# Altium footprint library SamacSys.PcbLib: 1008 footprints (part 12 of 63)
Each footprint in its own frame and in the unit in brackets; x right, y up, seen from the top. Pads: shape width x height; smd on the part's side, far side on the other; paste and mask are expansions set on the pad; w line width, h text height; cw(c..) or ccw(c..) is an arc to the next point about the centre after c.
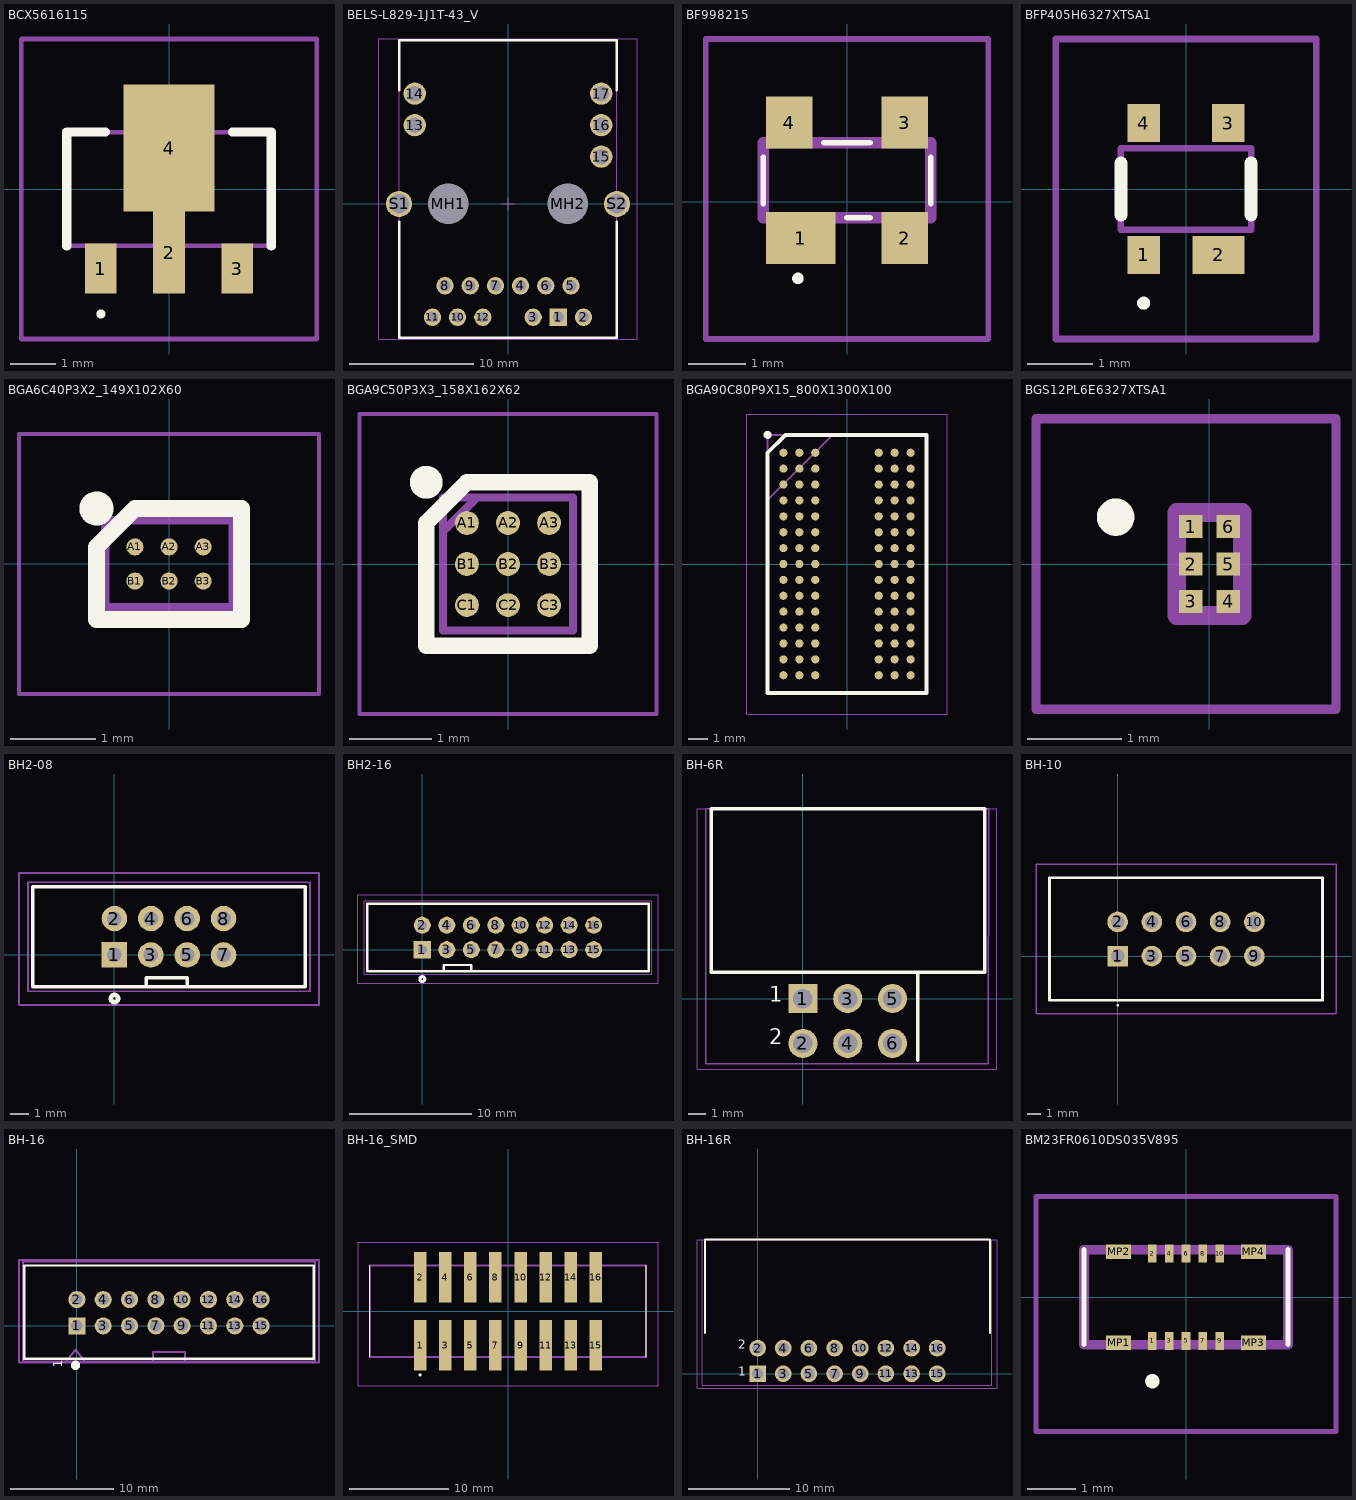
[diagram p11: the footprints below, top view; thin cyan lines are the x and y axes]

## BCX5616115 [mm]
pads (4):
  rect 0.7x1.1 smd: 1(-1.5,-1.75) 3(1.5,-1.75)
  rect 0.7x1.8 smd: 2(0,-1.4)
  rect 2x2.8 smd: 4(0,0.9)
Top Overlay:
  lines w0.1: -1.5,-2.8 ccw(c-1.5,-2.75) -1.5,-2.7 ccw(c-1.5,-2.75) -1.5,-2.8
  lines w0.2: -2.25,-1.25 -2.25,1.25 -1.4,1.25 ; 1.4,1.25 2.25,1.25 2.25,-1.25
Assembly:
  lines w0.1: -2.25,-1.25 -2.25,1.25 2.25,1.25 2.25,-1.25 -2.25,-1.25
Countryard:
  lines w0.1: -3.25,-3.3 -3.25,3.3 3.25,3.3 3.25,-3.3 -3.25,-3.3
3D body "BCX56-16,115.stp": height 1.51, standoff 0, extent -2.248,-1.999 2.252,2.001

## BELS-L829-1J1T-43_V [mm]
pads (21):
  rect 1.4x1.4 hole 0.89: 1(4.064,-9.144)
  round 1.4 hole 0.89: 2(6.096,-9.144) 3(2.032,-9.144) 4(1.016,-6.604) 5(5.08,-6.604) 6(3.048,-6.604) 7(-1.016,-6.604) 8(-5.08,-6.604) 9(-3.048,-6.604) 10(-4.064,-9.144) 11(-6.096,-9.144) 12(-2.032,-9.144)
  round 1.8 hole 1.27: 13(-7.518,6.35) 14(-7.518,8.89) 15(7.518,3.81) 16(7.518,6.35) 17(7.518,8.89)
  round 2.95 hole 3.25 unplated: MH1(-4.826,0) MH2(4.826,0)
  round 2.1 hole 1.57: S1(-8.788,0) S2(8.788,0)
Top Overlay:
  lines w0.2: -8.79,-1.45 -8.79,-10.8 8.79,-10.8 8.79,-1.45 ; -8.79,9.169 -8.79,13.2 8.79,13.2 8.79,9.169
Assembly:
  lines w0.1: -8.79,-10.74 8.79,-10.74 8.79,13.2 -8.79,13.2 -8.79,-10.74
Countryard:
  lines w0.05: -10.445,-10.9 -10.445,13.3 10.445,13.3 10.445,-10.9 -10.445,-10.9
  lines w0.1: -0.5,0 0.5,0 ; 0,-0.5 0,0.5
3D body "L829-1J1T-43.stp": height 12.74, standoff -3.81, extent -10.346,-10.8 10.345,13.2

## BF998215 [mm]
pads (4):
  rect 1.2x0.9 smd: 1(-0.8,-0.625)
  rect 0.8x0.9 smd: 2(1,-0.625) 3(1,1.375) 4(-1,1.375)
Top Overlay:
  lines w0.1: -1.45,-0.025 -1.45,0.775 ; -0.4,1.025 0.4,1.025 ; 0,-0.275 0.4,-0.275 ; 1.45,-0.025 1.45,0.775 ; -0.9,-1.325 ccw(c-0.85,-1.325) -0.8,-1.325 ccw(c-0.85,-1.325) -0.9,-1.325
Assembly:
  lines w0.2: -1.45,-0.275 -1.45,1.025 1.45,1.025 1.45,-0.275 -1.45,-0.275
Countryard:
  lines w0.1: -2.45,-2.375 -2.45,2.825 2.45,2.825 2.45,-2.375 -2.45,-2.375
3D body "BAS3007ARPPE6327HTSA1.stp": height 1.1, standoff 0, extent -1.2,-0.9 1.2,2

## BFP405H6327XTSA1 [mm]
pads (4):
  rect 0.5x0.58 smd: 1(-0.65,-1.01) 3(0.65,1.01) 4(-0.65,1.01)
  rect 0.8x0.58 smd: 2(0.5,-1.01)
Top Overlay:
  lines w0.1: -0.65,-1.8 cw(c-0.65,-1.75) -0.65,-1.7 cw(c-0.65,-1.75) -0.65,-1.8
  lines w0.2: -1,-0.4 -1,0.4 ; 1,-0.4 1,0.4
Assembly:
  lines w0.1: -1,-0.625 1,-0.625 1,0.625 -1,0.625 -1,-0.625
Countryard:
  lines w0.1: -2,-2.3 2,-2.3 2,2.3 -2,2.3 -2,-2.3

## BGA6C40P3X2_149X102X60 [mm]
pads (6):
  round 0.2 smd: A1(-0.4,0.2) A2(0,0.2) A3(0.4,0.2) B1(-0.4,-0.2) B2(0,-0.2) B3(0.4,-0.2)
Top Overlay:
  circle w0.2: c-0.85,0.65 r0.1
  lines w0.2: -0.85,-0.65 -0.85,0.2 -0.4,0.65 0.85,0.65 0.85,-0.65 -0.85,-0.65
Assembly:
  lines w0.1: -0.745,0.249 -0.484,0.51 ; -0.745,-0.51 -0.745,0.51 0.745,0.51 0.745,-0.51 -0.745,-0.51
Countryard:
  lines w0.05: -1.758,-1.523 -1.758,1.522 1.757,1.522 1.757,-1.523 -1.758,-1.523
3D body "AS6221.stp": height 0.6, standoff 0, extent -0.745,-0.51 0.745,0.51

## BGA9C50P3X3_158X162X62 [mm]
pads (9):
  round 0.29 smd: A1(-0.5,0.5) A2(0,0.5) A3(0.5,0.5) B1(-0.5,0) B2(0,0) B3(0.5,0) C1(-0.5,-0.5) C2(0,-0.5) C3(0.5,-0.5)
Top Overlay:
  circle w0.2: c-0.995,0.995 r0.1
  lines w0.2: -0.995,-0.995 -0.995,0.5 -0.5,0.995 0.995,0.995 0.995,-0.995 -0.995,-0.995
Assembly:
  lines w0.1: -0.79,0.398 -0.377,0.811 ; -0.79,-0.81 -0.79,0.81 0.79,0.81 0.79,-0.81 -0.79,-0.81
Countryard:
  lines w0.05: -1.805,-1.825 -1.805,1.826 1.805,1.826 1.805,-1.825 -1.805,-1.825
3D body "BQ27220YZFR.stp": height 0.63, standoff 0, extent -0.79,-0.81 0.79,0.81

## BGA90C80P9X15_800X1300X100 [mm]
pads (90):
  round 0.41 smd: A1(-3.2,5.6) A2(-2.4,5.6) A3(-1.6,5.6) A7(1.6,5.6) A8(2.4,5.6) A9(3.2,5.6) B1(-3.2,4.8) B2(-2.4,4.8) B3(-1.6,4.8) B7(1.6,4.8) B8(2.4,4.8) B9(3.2,4.8) C1(-3.2,4) C2(-2.4,4) C3(-1.6,4) C7(1.6,4) C8(2.4,4) C9(3.2,4) D1(-3.2,3.2) D2(-2.4,3.2) D3(-1.6,3.2) D7(1.6,3.2) D8(2.4,3.2) D9(3.2,3.2) E1(-3.2,2.4) E2(-2.4,2.4) E3(-1.6,2.4) E7(1.6,2.4) E8(2.4,2.4) E9(3.2,2.4) F1(-3.2,1.6) F2(-2.4,1.6) F3(-1.6,1.6) F7(1.6,1.6) F8(2.4,1.6) F9(3.2,1.6) G1(-3.2,0.8) G2(-2.4,0.8) G3(-1.6,0.8) G7(1.6,0.8) G8(2.4,0.8) G9(3.2,0.8) H1(-3.2,0) H2(-2.4,0) H3(-1.6,0) H7(1.6,0) H8(2.4,0) H9(3.2,0) J1(-3.2,-0.8) J2(-2.4,-0.8) J3(-1.6,-0.8) J7(1.6,-0.8) J8(2.4,-0.8) J9(3.2,-0.8) K1(-3.2,-1.6) K2(-2.4,-1.6) K3(-1.6,-1.6) K7(1.6,-1.6) K8(2.4,-1.6) K9(3.2,-1.6) L1(-3.2,-2.4) L2(-2.4,-2.4) L3(-1.6,-2.4) L7(1.6,-2.4) L8(2.4,-2.4) L9(3.2,-2.4) M1(-3.2,-3.2) M2(-2.4,-3.2) M3(-1.6,-3.2) M7(1.6,-3.2) M8(2.4,-3.2) M9(3.2,-3.2) N1(-3.2,-4) N2(-2.4,-4) N3(-1.6,-4) N7(1.6,-4) N8(2.4,-4) N9(3.2,-4) P1(-3.2,-4.8) P2(-2.4,-4.8) P3(-1.6,-4.8) P7(1.6,-4.8) P8(2.4,-4.8) P9(3.2,-4.8) R1(-3.2,-5.6) R2(-2.4,-5.6) R3(-1.6,-5.6) R7(1.6,-5.6) R8(2.4,-5.6) R9(3.2,-5.6)
Top Overlay:
  circle w0.2: c-4,6.5 r0.1
  lines w0.2: -4,-6.5 -4,5.6 -3.1,6.5 4,6.5 4,-6.5 -4,-6.5
Assembly:
  lines w0.1: -4,3.225 -0.725,6.5 ; -4,-6.5 -4,6.5 4,6.5 4,-6.5 -4,-6.5
Countryard:
  lines w0.05: -5.05,-7.55 -5.05,7.55 5.05,7.55 5.05,-7.55 -5.05,-7.55
3D body "MT48LC4M32B2B5-6A_IT_L_TR.stp": height 1, standoff 0, extent -4,-6.5 4,6.5

## BGS12PL6E6327XTSA1 [mm]
pads (6):
  rect 0.25x0.25 smd: 1(-0.2,0.4) 2(-0.2,0) 3(-0.2,-0.4) 4(0.2,-0.4) 5(0.2,0) 6(0.2,0.4)
Top Overlay:
  lines w0.2: -1,0.4 ccw(c-1,0.5) -1,0.6 ccw(c-1,0.5) -1,0.4
Assembly:
  lines w0.2: -0.35,-0.55 0.35,-0.55 0.35,0.55 -0.35,0.55 -0.35,-0.55
Countryard:
  lines w0.1: -1.85,-1.55 1.35,-1.55 1.35,1.55 -1.85,1.55 -1.85,-1.55
3D body "BGS12PL6E6327XTSA1.stp": height 0.42, standoff 0, extent -0.35,-0.55 0.35,0.55

## BH2-08 [mm] "IDC2-08"
height 9
pads (8):
  rect 1.4x1.4 hole 0.8: 1(0,0)
  round 1.4 hole 0.8: 2(0,2) 3(2,0) 4(2,2) 5(4,0) 6(4,2) 7(6,0) 8(6,2)
Top Overlay:
  lines w0.2: 1.75,-1.75 1.75,-1.25 4,-1.25 4,-1.75 ; -4.5,-1.75 10.5,-1.75 10.5,3.75 -4.5,3.75 -4.5,-1.75
  lines w0.25: 0,-2.6 cw(c0,-2.4) 0,-2.2 cw(c0,-2.4) 0,-2.6
Assembly:
  lines w0.1: -4.75,-2 10.75,-2 10.75,4 -4.75,4 -4.75,-2
Countryard:
  lines w0.1: -5.25,-2.75 11.25,-2.75 11.25,4.5 -5.25,4.5 -5.25,-2.75
3D body "User Library-BH2-08.STEP": height 5.6, standoff -2.5, extent -4.55,-1.7 10.55,3.7

## BH2-16 [mm] "IDC2-16"
height 9
pads (16):
  rect 1.4x1.4 hole 0.8: 1(0,0)
  round 1.4 hole 0.8: 2(0,2) 3(2,0) 4(2,2) 5(4,0) 6(4,2) 7(6,0) 8(6,2) 9(8,0) 10(8,2) 11(10,0) 12(10,2) 13(12,0) 14(12,2) 15(14,0) 16(14,2)
Top Overlay:
  lines w0.2: 1.75,-1.75 1.75,-1.25 4,-1.25 4,-1.75 ; -4.5,-1.75 -4.5,3.75 18.5,3.75 18.5,-1.75 -4.5,-1.75
  lines w0.25: 0,-2.6 ccw(c0,-2.4) 0,-2.2 ccw(c0,-2.4) 0,-2.6
Assembly:
  lines w0.1: -4.75,-2 -4.75,4 18.75,4 18.75,-2 -4.75,-2
Countryard:
  lines w0.1: -5.25,-2.75 -5.25,4.5 19.25,4.5 19.25,-2.75 -5.25,-2.75
3D body "User Library-BH2-08.STEP": height 5.6, standoff -2.5, extent 3.45,-1.7 18.55,3.7
3D body "User Library-BH2-08.STEP": height 5.6, standoff -2.5, extent -4.55,-1.7 10.55,3.7

## BH-6R [mm] "IDC Connector, 6 pin"
height 9
pads (6):
  rect 1.65x1.65 hole 1.1: 1(0,0)
  round 1.65 hole 1.1: 2(0,-2.54) 3(2.54,0) 4(2.54,-2.54) 5(5.08,0) 6(5.08,-2.54)
Top Overlay:
  lines w0.2: 6.5,-3.5 6.5,1.489 ; -5.2,1.5 -5.2,10.75 10.3,10.75 10.3,1.5 -5.2,1.5
  text "2" at -1.9,-2.9 h1.5
  text "1" at -1.9,-0.5 h1.5
Assembly:
  lines w0.1: -5.5,-3.7 10.498,-3.7 10.533,10.75 -5.5,10.75 -5.5,-3.7
Countryard:
  lines w0.05: -6,-4 11,-4 11,10.75 -6,10.75 -6,-4
3D body "IDC-Header_2x03_P2.54mm_Horizontal.step": height 9.1, standoff -3, extent -5.1,-2.82 10.18,10.73

## BH-10 [mm]
height 9
pads (10):
  rect 1.53x1.53 hole 1.02: 1(0,0)
  round 1.53 hole 1.02: 2(0,2.54) 3(2.54,0) 4(2.54,2.54) 5(5.08,0) 6(5.08,2.54) 7(7.62,0) 8(7.62,2.54) 9(10.16,0) 10(10.16,2.54)
Top Overlay:
  lines w0.1: 0,-3.7 ccw(c0,-3.65) 0,-3.6 ccw(c0,-3.65) 0,-3.7
  lines w0.2: -5.07,-3.28 -5.07,5.82 15.23,5.82 15.23,-3.28 -5.07,-3.28
Assembly:
  lines w0.1: -5.07,-3.28 -5.07,5.82 15.23,5.82 15.23,-3.28 -5.07,-3.28
Countryard:
  lines w0.1: -6.07,-4.28 -6.07,6.82 16.23,6.82 16.23,-4.28 -6.07,-4.28
3D body "User Library-BH-10__64.step": height 9.1, standoff -3, extent -5.17,-3.28 15.33,6.02

## BH-16 [mm]
pads (16):
  rect 1.65x1.65 hole 1.1: 1(0,0)
  round 1.65 hole 1.1: 2(0,2.54) 3(2.54,0) 4(2.54,2.54) 5(5.08,0) 6(5.08,2.54) 7(7.62,0) 8(7.62,2.54) 9(10.16,0) 10(10.16,2.54) 11(12.7,0) 12(12.7,2.54) 13(15.24,0) 14(15.24,2.54) 15(17.78,0) 16(17.78,2.54)
Top Overlay:
  circle w0.5: c-0.127,-3.81 r0.2
  lines w0.2: -5.08,-3.175 22.86,-3.175 22.86,5.842 -5.08,5.842 -5.08,-3.175
  text "1" at -1.143,-4.064 h1.5
Top Assembly:
  lines w0.2: -1.016,-3.429 -0.127,-2.286 0.762,-3.429 ; 7.366,-3.302 7.366,-2.54 10.414,-2.54 10.414,-3.429 ; -5.207,-3.429 -5.207,6.223 22.987,6.223 22.987,-3.429 -5.207,-3.429
Top Courtyard:
  lines w0.2: -5.588,-3.556 -5.588,6.35 23.368,6.35 23.368,-3.556 -5.588,-3.556
3D body "BH-16.STEP": height 8.9, standoff -3.5, extent -5.06,-3.048 22.84,5.952

## BH-16_SMD [mm]
pads (16):
  rect 1.27x5.08 smd: 1(-8.89,-3.43) 2(-8.89,3.43) 3(-6.35,-3.43) 4(-6.35,3.43) 5(-3.81,-3.43) 6(-3.81,3.43) 7(-1.27,-3.43) 8(-1.27,3.43) 9(1.27,-3.43) 10(1.27,3.43) 11(3.81,-3.43) 12(3.81,3.43) 13(6.35,-3.43) 14(6.35,3.43) 15(8.89,-3.43) 16(8.89,3.43)
Top Overlay:
  circle w0.2: c-8.89,-6.43 r0.05
  lines w0.1: -13.97,-4.635 -13.97,4.635 ; 13.97,-4.635 13.97,4.635
Assembly:
  lines w0.2: -13.97,-4.635 -13.97,4.635 13.97,4.635 13.97,-4.635 -13.97,-4.635
Countryard:
  lines w0.05: -15.17,-7.53 -15.17,6.97 15.17,6.97 15.17,-7.53 -15.17,-7.53
3D body "HTST-108-01-L-DV-P-TR.stp": height 11.43, standoff 0, extent -13.97,-5.868 13.97,5.308

## BH-16R [mm]
pads (16):
  rect 1.65x1.65 hole 1.1: 1(0,0)
  round 1.65 hole 1.1: 2(0,2.54) 3(2.54,0) 4(2.54,2.54) 5(5.08,0) 6(5.08,2.54) 7(7.62,0) 8(7.62,2.54) 9(10.16,0) 10(10.16,2.54) 11(12.7,0) 12(12.7,2.54) 13(15.24,0) 14(15.24,2.54) 15(17.78,0) 16(17.78,2.54)
Top Overlay:
  lines w0.2: -5.2,4.04 -5.2,13.29 23,13.29 23,4.04
  text "1" at -1.9,-0.5 h1.5
  text "2" at -1.9,2.18 h1.5
Assembly:
  lines w0.1: -5.5,-1.16 -5.5,13.29 23.2,13.29 23.2,-1.16 -5.5,-1.16
Countryard:
  lines w0.05: -6,-1.46 -6,13.29 23.7,13.29 23.7,-1.46 -6,-1.46
3D body "BH-16R.STEP": height 8.13, standoff -3.71, extent -5.08,-0.381 22.86,12.659

## BM23FR0610DS035V895 [mm]
pads (14):
  rect 0.18x0.38 smd: 1(-0.7,-0.91) 2(-0.7,0.91) 3(-0.35,-0.91) 4(-0.35,0.91) 5(0,-0.91) 6(0,0.91) 7(0.35,-0.91) 8(0.35,0.91) 9(0.7,-0.91) 10(0.7,0.91)
  rect 0.52x0.3 smd: MP1(-1.405,-0.95) MP2(-1.405,0.95) MP3(1.405,-0.95) MP4(1.405,0.95)
Top Overlay:
  lines w0.1: -2.125,-0.99 -2.125,1 -2.125,-0.99 ; 2.125,-0.99 2.125,1 2.125,-0.99
  lines w0.2: -0.7,-1.8 cw(c-0.7,-1.75) -0.7,-1.7 ; -0.7,-1.8 ccw(c-0.7,-1.75) -0.7,-1.7 ; -0.7,-1.8 cw(c-0.7,-1.75) -0.7,-1.7
Assembly:
  lines w0.2: -2.125,-0.99 -2.125,0.99 2.125,0.99 2.125,-0.99 -2.125,-0.99
Countryard:
  lines w0.1: -3.125,-2.8 -3.125,2.1 3.125,2.1 3.125,-2.8 -3.125,-2.8
3D body "BM23FR0.6-10DS-0.35V_895_.stp": height 0.8, standoff 0, extent -2.125,-1.082 2.125,1.082